# Altium schematic symbol library ADPL42010A.SchLib: 1 symbol
Pins are listed as number, name and electrical type; pins without a type are passive.

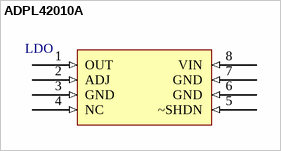
[diagram p0: symbol ADPL42010A]

## ADPL42010A
designator LDO  (value not drawn)
pins: 1 OUT (in), 2 ADJ (in), 3 GND (in), 4 NC (in), 5 ~SHDN (in), 6 GND (in), 7 GND (in), 8 VIN (in)